# Altium schematic symbol library Schlib1.SchLib: 1 symbol
Pins are listed as number, name and electrical type; pins without a type are passive.

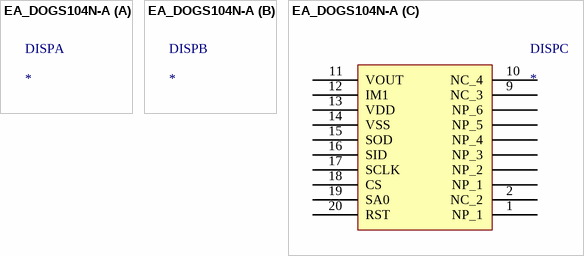
[diagram p0: symbol EA_DOGS104N-A]

## EA_DOGS104N-A
designator DISP
part C pins: 1 NP_1, 2 NC_2, 9 NC_3, 10 NC_4, 11 VOUT, 12 IM1, 13 VDD, 14 VSS, 15 SOD, 16 SID, 17 SCLK, 18 CS, 19 SA0, 20 RST, ? NP_6, ? NP_5, ? NP_4, ? NP_3, ? NP_2, ? NP_1